# Altium footprint library TitansLib.PcbLib: 333 footprints (part 19 of 21)
Each footprint in its own frame and in the unit in brackets; x right, y up, seen from the top. Pads: shape width x height; smd on the part's side, far side on the other; paste and mask are expansions set on the pad; w line width, h text height; cw(c..) or ccw(c..) is an arc to the next point about the centre after c.
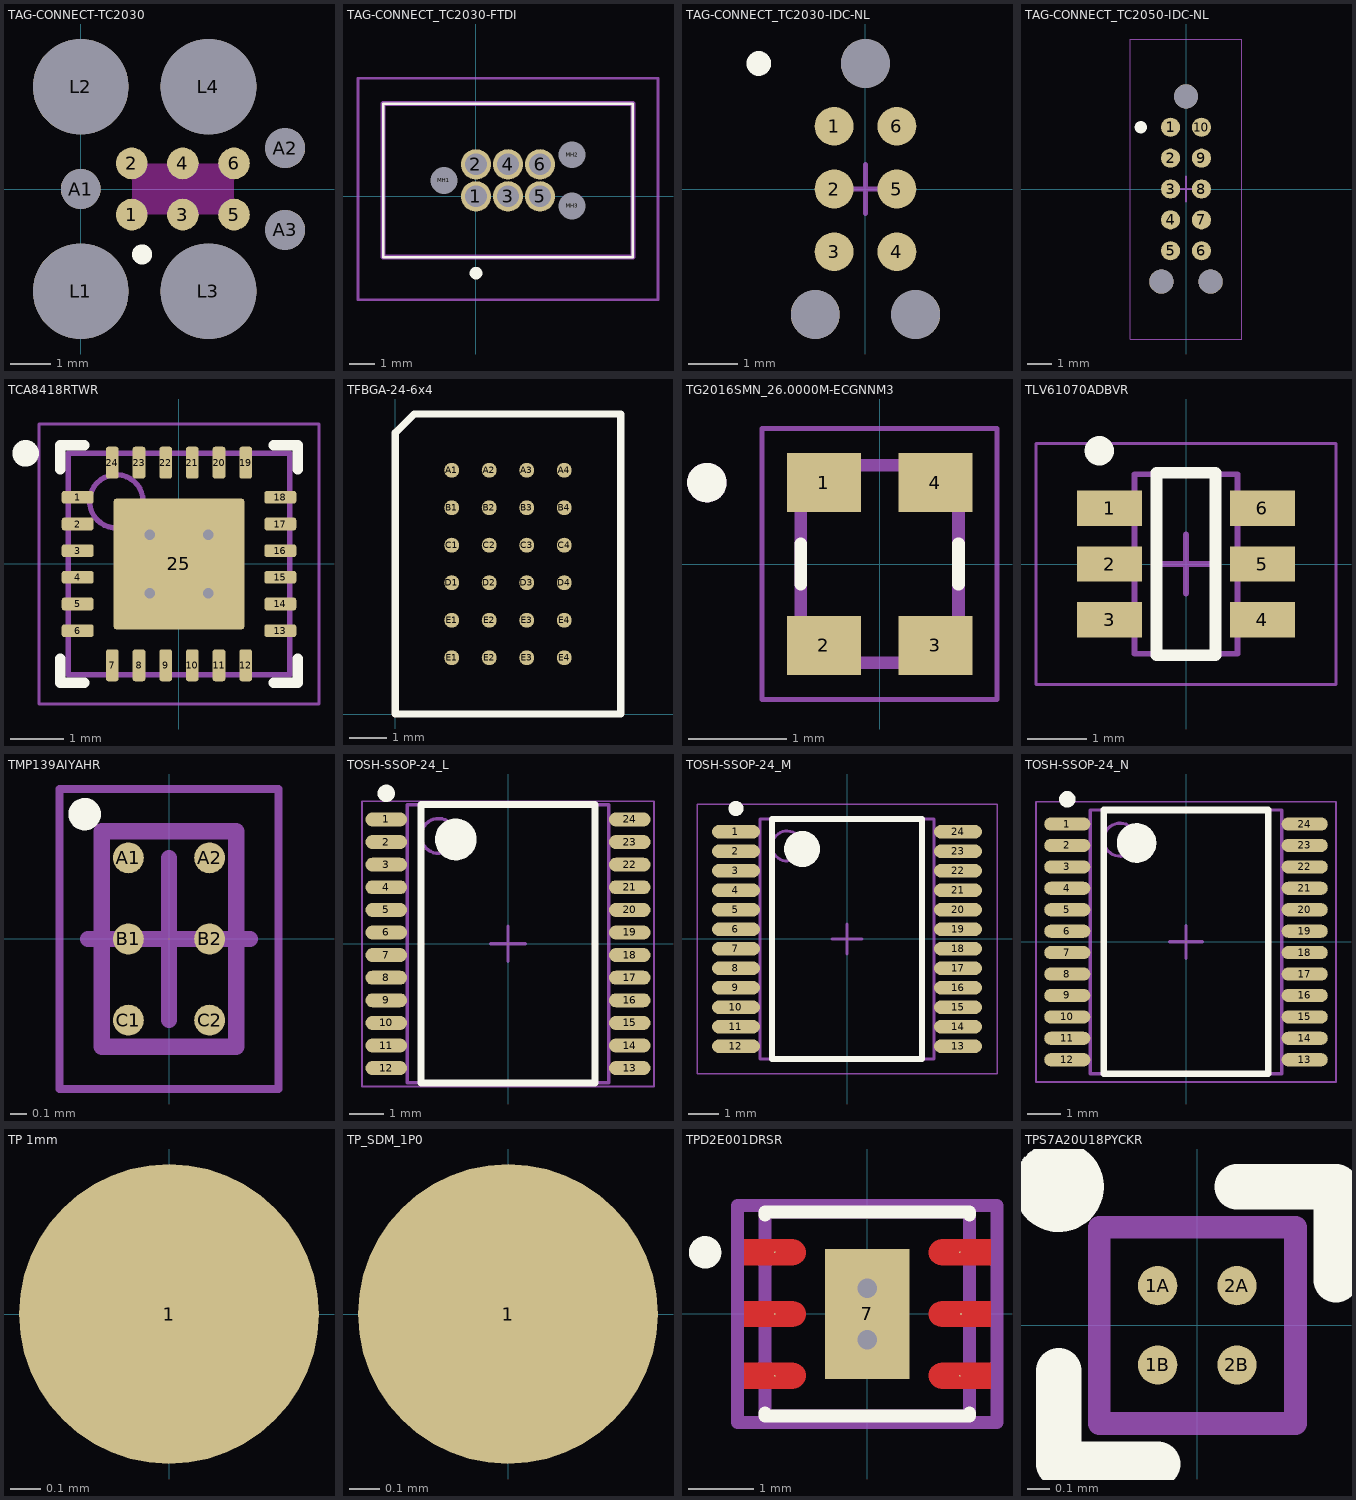
[diagram p18: the footprints below, top view; thin cyan lines are the x and y axes]

## TAG-CONNECT-TC2030 [mm]
pads (13):
  round 0.787 smd: 1(1.27,-0.635) 2(1.27,0.635) 3(2.54,-0.635) 4(2.54,0.635) 5(3.81,-0.635) 6(3.81,0.635)
  round 0.991 hole 0.991 unplated: A1(0,0) A2(5.08,1.016) A3(5.08,-1.016)
  round 2.375 hole 2.375 unplated: L1(0,-2.54) L2(0,2.54) L3(3.175,-2.54) L4(3.175,2.54)
Top Overlay:
  circle w0.3: c1.525,-1.625 r0.1
Keep-Out Layer:
  rectangle: 1.27,-0.635 3.81,0.635

## TAG-CONNECT_TC2030-FTDI [mm]
pads (9):
  round 1.2 hole 0.863: 1(0,0) 2(0,1.27) 3(1.27,0) 4(1.27,1.27) 5(2.54,0) 6(2.54,1.27)
  round 0.533 hole 1.067 unplated: MH1(-1.27,0.635) MH2(3.81,1.651) MH3(3.81,-0.381)
Top Overlay:
  lines w0.1: -3.683,-2.413 -3.683,3.683 6.223,3.683 6.223,-2.413 -3.683,-2.413
  lines w0.4: 0,-3.1 cw(c0,-3.05) 0,-3 ; 0,-3.1 ccw(c0,-3.05) 0,-3 ; 0,-3.1 cw(c0,-3.05) 0,-3
Mechanical 13:
  lines w0.2: -3.683,-2.413 -3.683,3.683 6.223,3.683 6.223,-2.413 -3.683,-2.413
Mechanical 15:
  lines w0.1: -4.683,-4.1 -4.683,4.683 7.223,4.683 7.223,-4.1 -4.683,-4.1

## TAG-CONNECT_TC2030-IDC-NL [mil] "2x3 tag connect"
pads (9):
  round 30.98 smd paste-39.37: 1(-25,50) 2(-25,0) 3(-25,-50) 4(25,-50) 5(25,0) 6(25,50)
  round 39.02 hole 39.02 unplated: ""(-40,-100) ""(0,100) ""(40,-100)
Top Overlay:
  circle w11.81: c-85,100 r3.94
Top Component Center:
  lines w3.94: -19.68,0 19.69,0 ; 0,-19.68 0,19.69

## TAG-CONNECT_TC2050-IDC-NL [mm]
pads (13):
  round 0.787 smd paste-1 mask+0.102: 1(-0.635,2.54) 2(-0.635,1.27) 3(-0.635,0) 4(-0.635,-1.27) 5(-0.635,-2.54) 6(0.635,-2.54) 7(0.635,-1.27) 8(0.635,0) 9(0.635,1.27) 10(0.635,2.54)
  round 0.991 hole 0.991 unplated: ""(-1.015,-3.81) ""(0,3.81) ""(1.015,-3.81)
Top Overlay:
  circle w0.3: c-1.859,2.54 r0.1
Top Courtyard:
  lines w0.05: -2.295,-6.17 2.295,-6.17 2.295,6.17 -2.295,6.17 -2.295,-6.17
Top Component Center:
  lines w0.1: -0.5,0 0.5,0 ; 0,-0.5 0,0.5

## TCA8418RTWR [mm] "QFN, 24-Leads, Body 4.00x4.00mm, Pitch 0.50mm, Thermal Pad 2.50x2.50mm, IPC Medium Density"
height 0.8
pads (25):
  rrect41% 0.6x0.24 smd mask+0.05: 1(-1.9,1.25) 2(-1.9,0.75) 3(-1.9,0.25) 4(-1.9,-0.25) 5(-1.9,-0.75) 6(-1.9,-1.25) 13(1.9,-1.25) 14(1.9,-0.75) 15(1.9,-0.25) 16(1.9,0.25) 17(1.9,0.75) 18(1.9,1.25)
  rrect41% 0.24x0.6 smd mask+0.05: 7(-1.25,-1.9) 8(-0.75,-1.9) 9(-0.25,-1.9) 10(0.25,-1.9) 11(0.75,-1.9) 12(1.25,-1.9) 19(1.25,1.9) 20(0.75,1.9) 21(0.25,1.9) 22(-0.25,1.9) 23(-0.75,1.9) 24(-1.25,1.9)
  rrect4% 2.45x2.45 smd mask+0.05: 25(0,0)
via -0.55,0.55 diameter 0.5 hole 0.2
via 0.55,0.55 diameter 0.5 hole 0.2
via -0.55,-0.55 diameter 0.5 hole 0.2
via 0.55,-0.55 diameter 0.5 hole 0.2
Top Overlay:
  circle w0.25: c-2.875,2.075 r0.125
  lines w0.2: -2.225,-1.775 -2.225,-2.225 -1.775,-2.225 ; -2.225,1.775 -2.225,2.225 -1.775,2.225 ; 1.775,-2.225 2.225,-2.225 2.225,-1.775 ; 1.775,2.225 2.225,2.225 2.225,1.775
Top Courtyard:
  lines w0.05: -2.625,-2.625 -2.625,2.625 2.625,2.625 2.625,-2.625 -2.625,-2.625
  lines w0.1: -0.5,0 0.5,0 ; 0,-0.5 0,0.5
Top Assembly:
  circle w0.1: c-1.175,1.175 r0.5
  lines w0.1: -2.075,-2.075 -2.075,2.075 2.075,2.075 2.075,-2.075 -2.075,-2.075
3D body "QFN50P400X400X80_HS-25N.step": height 0.8, standoff 0, extent -2.125,-2.125 2.125,2.125

## TFBGA-24-6x4 [mm]
pads (24):
  round 0.4 smd: A1(1.5,6.5) A2(2.5,6.5) A3(3.5,6.5) A4(4.5,6.5) B1(1.5,5.5) B2(2.5,5.5) B3(3.5,5.5) B4(4.5,5.5) C1(1.5,4.5) C2(2.5,4.5) C3(3.5,4.5) C4(4.5,4.5) D1(1.5,3.5) D2(2.5,3.5) D3(3.5,3.5) D4(4.5,3.5) E1(1.5,1.5) E1(1.5,2.5) E2(2.5,1.5) E2(2.5,2.5) E3(3.5,1.5) E3(3.5,2.5) E4(4.5,1.5) E4(4.5,2.5)
Top Overlay:
  lines w0.2: 0,0 0,7.5 0.5,8 6,8 6,0 0,0

## TG2016SMN_26.0000M-ECGNNM3 [mm]
height 0.8
pads (4):
  rect 0.75x0.6 smd mask+0.05: 1(-0.565,0.825) 2(-0.565,-0.825) 3(0.565,-0.825) 4(0.565,0.825)
Top Overlay:
  circle w0.2: c-1.75,0.825 r0.1
  lines w0.127: -0.8,-0.205 -0.8,0.205 ; 0.8,-0.205 0.8,0.205
Mechanical 13:
  circle w0.2: c-1.75,0.825 r0.1
  lines w0.127: -0.8,-1 -0.8,1 0.8,1 0.8,-1 -0.8,-1
Mechanical 15:
  lines w0.05: -1.19,-1.375 1.19,-1.375 1.19,1.375 -1.19,1.375 -1.19,-1.375

## TLV61070ADBVR [mm] "SOT23, 6-Leads, Body 2,90x2,80mm, Pitch 0,95mm, IPC Low Density"
height 1.45
pads (6):
  rect 1.1x0.6 smd: 1(-1.3,0.95) 2(-1.3,0) 3(-1.3,-0.95) 4(1.3,-0.95) 5(1.3,0) 6(1.3,0.95)
Top Overlay:
  circle w0.25: c-1.475,1.925 r0.125
  lines w0.2: -0.5,-1.55 0.5,-1.55 0.5,1.55 -0.5,1.55 -0.5,-1.55
Top Courtyard:
  lines w0.05: -2.55,-2.05 -2.55,2.05 2.55,2.05 2.55,-2.05 -2.55,-2.05
  lines w0.1: -0.5,0 0.5,0 ; 0,-0.5 0,0.5
Top Assembly:
  lines w0.1: -0.875,-1.525 -0.875,1.525 0.875,1.525 0.875,-1.525 -0.875,-1.525
3D body "TLV61070ADBVR.step": height 1.45, standoff 0, extent -1.5,-1.525 1.5,1.525

## TMP139AIYAHR [mm] "BGA, 6-Leads, Body 0,83x1,33mmx0,40mm, Pitch 0,50mm"
height 0.4
pads (6):
  round 0.19 smd: A1(-0.25,0.5) A2(0.25,0.5) B1(-0.25,0) B2(0.25,0) C1(-0.25,-0.5) C2(0.25,-0.5)
Top Overlay:
  circle w0.1: c-0.52,0.77 r0.05
Top Courtyard:
  lines w0.05: -0.675,-0.925 0.675,-0.925 0.675,0.925 -0.675,0.925 -0.675,-0.925
  lines w0.1: -0.5,0 0.5,0 ; 0,-0.5 0,0.5
Top Assembly:
  lines w0.1: -0.415,-0.665 0.415,-0.665 0.415,0.665 -0.415,0.665 -0.415,-0.665
3D body "TMP139AIYAHR.step": height 0.4, standoff 0, extent -0.415,-0.665 0.415,0.665

## TOSH-SSOP-24_L [mm] "SOP, 24-Leads, Body 8x5.8mm, Pitch 0.65mm, IPC High Density"
height 1.6
pads (24):
  oval 1.2x0.4 smd: 1(-3.5,3.575) 2(-3.5,2.925) 3(-3.5,2.275) 4(-3.5,1.625) 5(-3.5,0.975) 6(-3.5,0.325) 7(-3.5,-0.325) 8(-3.5,-0.975) 9(-3.5,-1.625) 10(-3.5,-2.275) 11(-3.5,-2.925) 12(-3.5,-3.575) 13(3.5,-3.575) 14(3.5,-2.925) 15(3.5,-2.275) 16(3.5,-1.625) 17(3.5,-0.975) 18(3.5,-0.325) 19(3.5,0.325) 20(3.5,0.975) 21(3.5,1.625) 22(3.5,2.275) 23(3.5,2.925) 24(3.5,3.575)
Top Overlay:
  circle w0.6: c-1.5,3 r0.3
  circle w0.25: c-3.5,4.325 r0.125
  lines w0.2: -2.5,-4 2.5,-4 2.5,4 -2.5,4 -2.5,-4
Mechanical 13:
  circle w0.1: c-2,3.1 r0.5
  lines w0.1: -2.9,-4 2.9,-4 2.9,4 -2.9,4 -2.9,-4
Mechanical 15:
  lines w0.05: -4.2,-4.1 4.2,-4.1 4.2,4.1 -4.2,4.1 -4.2,-4.1
  lines w0.1: -0.5,0 0.5,0 ; 0,-0.5 0,0.5
3D body "TSOP65P760X160-24L.step": height 1.6, standoff 0, extent -3.8,-4 3.8,4

## TOSH-SSOP-24_M [mm] "SOP, 24-Leads, Body 8x5.8mm, Pitch 0.65mm, IPC Low Density"
height 1.6
pads (24):
  oval 1.6x0.45 smd: 1(-3.7,3.575) 2(-3.7,2.925) 3(-3.7,2.275) 4(-3.7,1.625) 5(-3.7,0.975) 6(-3.7,0.325) 7(-3.7,-0.325) 8(-3.7,-0.975) 9(-3.7,-1.625) 10(-3.7,-2.275) 11(-3.7,-2.925) 12(-3.7,-3.575) 13(3.7,-3.575) 14(3.7,-2.925) 15(3.7,-2.275) 16(3.7,-1.625) 17(3.7,-0.975) 18(3.7,-0.325) 19(3.7,0.325) 20(3.7,0.975) 21(3.7,1.625) 22(3.7,2.275) 23(3.7,2.925) 24(3.7,3.575)
Top Overlay:
  circle w0.25: c-3.7,4.35 r0.125
  circle w0.6: c-1.5,3 r0.3
  lines w0.2: -2.5,-4 -2.5,4 2.5,4 2.5,-4 -2.5,-4
Mechanical 13:
  circle w0.1: c-2,3.1 r0.5
  lines w0.1: -2.9,-4 -2.9,4 2.9,4 2.9,-4 -2.9,-4
Mechanical 15:
  lines w0.05: -5,-4.5 -5,4.5 5,4.5 5,-4.5 -5,-4.5
  lines w0.1: -0.5,0 0.5,0 ; 0,-0.5 0,0.5
3D body "TSOP65P760X160-24M.step": height 1.6, standoff 0, extent -3.8,-4 3.8,4

## TOSH-SSOP-24_N [mm] "SOP, 24-Leads, Body 8x5.8mm, Pitch 0.65mm, IPC Medium Density"
height 1.6
pads (24):
  oval 1.4x0.4 smd: 1(-3.6,3.575) 2(-3.6,2.925) 3(-3.6,2.275) 4(-3.6,1.625) 5(-3.6,0.975) 6(-3.6,0.325) 7(-3.6,-0.325) 8(-3.6,-0.975) 9(-3.6,-1.625) 10(-3.6,-2.275) 11(-3.6,-2.925) 12(-3.6,-3.575) 13(3.6,-3.575) 14(3.6,-2.925) 15(3.6,-2.275) 16(3.6,-1.625) 17(3.6,-0.975) 18(3.6,-0.325) 19(3.6,0.325) 20(3.6,0.975) 21(3.6,1.625) 22(3.6,2.275) 23(3.6,2.925) 24(3.6,3.575)
Top Overlay:
  circle w0.25: c-3.6,4.325 r0.125
  circle w0.6: c-1.5,3 r0.3
  lines w0.2: -2.5,-4 -2.5,4 2.5,4 2.5,-4 -2.5,-4
Mechanical 13:
  circle w0.1: c-2,3.1 r0.5
  lines w0.1: -2.9,-4 -2.9,4 2.9,4 2.9,-4 -2.9,-4
Mechanical 15:
  lines w0.05: -4.55,-4.25 -4.55,4.25 4.55,4.25 4.55,-4.25 -4.55,-4.25
  lines w0.1: -0.5,0 0.5,0 ; 0,-0.5 0,0.5
3D body "TSOP65P760X160-24N.step": height 1.6, standoff 0, extent -3.8,-4 3.8,4

## TP 1mm [mm]
pads (1):
  round 1 smd paste-2539.97 mask+0.051: 1(0,0)

## TP_SDM_1P0 [mm]
pads (1):
  round 1 smd: 1(0,0)

## TPD2E001DRSR [mil]
pads (7):
  round 1 smd paste+0 mask+1.97: 1(-56.1,37.4) 2(-56.1,0) 3(-56.1,-37.4) 4(56.1,-37.4) 5(56.91,0) 6(56.1,37.4)
  rect 51.18x78.74 smd paste+0 mask+1.97: 7(0,0)
via 0,15.75 diameter 23.62 hole 11.81
via 0,-15.75 diameter 23.62 hole 11.81
Top Layer:
  region: 74.8,-45.28 45.28,-45.28 44.5,-45.28 42.98,-44.97 41.55,-44.38 40.26,-43.52 39.16,-42.42 38.3,-41.13 37.7,-39.7 37.4,-38.18 37.4,-37.4 37.4,-36.63 37.7,-35.1 38.3,-33.67 39.16,-32.38 40.26,-31.29 41.55,-30.42 42.98,-29.83 44.5,-29.53 45.28,-29.53 74.8,-29.53
  region: 74.8,-7.87 45.28,-7.87 44.5,-7.87 42.98,-7.57 41.55,-6.98 40.26,-6.12 39.16,-5.02 38.3,-3.73 37.7,-2.3 37.4,-0.78 37.4,0 37.4,0.78 37.7,2.3 38.3,3.73 39.16,5.02 40.26,6.12 41.55,6.98 42.98,7.57 44.5,7.87 45.28,7.87 74.8,7.87
  region: 74.8,29.53 45.28,29.53 44.5,29.53 42.98,29.83 41.55,30.42 40.26,31.29 39.16,32.38 38.3,33.67 37.7,35.1 37.4,36.63 37.4,37.4 37.4,38.18 37.7,39.7 38.3,41.13 39.16,42.42 40.26,43.52 41.55,44.38 42.98,44.97 44.5,45.28 45.28,45.28 74.8,45.28
  region: -74.8,45.28 -45.28,45.28 -44.5,45.28 -42.98,44.97 -41.55,44.38 -40.26,43.52 -39.16,42.42 -38.3,41.13 -37.7,39.7 -37.4,38.18 -37.4,37.4 -37.4,36.63 -37.7,35.1 -38.3,33.67 -39.16,32.38 -40.26,31.29 -41.55,30.42 -42.98,29.83 -44.5,29.53 -45.28,29.53 -74.8,29.53
  region: -74.8,7.87 -45.28,7.87 -44.5,7.87 -42.98,7.57 -41.55,6.98 -40.26,6.12 -39.16,5.02 -38.3,3.73 -37.7,2.3 -37.4,0.78 -37.4,0 -37.4,-0.78 -37.7,-2.3 -38.3,-3.73 -39.16,-5.02 -40.26,-6.12 -41.55,-6.98 -42.98,-7.57 -44.5,-7.87 -45.28,-7.87 -74.8,-7.87
  region: -74.8,-29.53 -45.28,-29.53 -44.5,-29.53 -42.98,-29.83 -41.55,-30.42 -40.26,-31.29 -39.16,-32.38 -38.3,-33.67 -37.7,-35.1 -37.4,-36.63 -37.4,-37.4 -37.4,-38.18 -37.7,-39.7 -38.3,-41.13 -39.16,-42.42 -40.26,-43.52 -41.55,-44.38 -42.98,-44.97 -44.5,-45.28 -45.28,-45.28 -74.8,-45.28
Top Overlay:
  circle w9.84: c-98.43,37.4 r4.92
  lines w7.87: -62.01,-60.04 -62.01,-62.01 62.01,-62.01 62.01,-60.04 ; -62.01,60.04 -62.01,62.01 62.01,62.01 62.01,60.04
Top 3D Body:
  lines w7.87: -62.01,-62.01 62.01,-62.01 62.01,62.01 -62.01,62.01 -62.01,-62.01
Top Courtyard:
  lines w7.87: -78.74,-65.94 78.74,-65.94 78.74,65.94 -78.74,65.94 -78.74,-65.94
Top Component Center:
  lines w3.94: -19.68,0 19.68,0 ; 0,-19.68 0,19.68
Top Assembly:
  lines w7.87: -78.74,-65.94 78.74,-65.94 78.74,65.94 -78.74,65.94 -78.74,-65.94
  text ".Designator" at 0,-0.02 h39.37
3D body "TPD2E001DRSR.step": height 32, standoff 0.5, extent -59.06,-59.06 59.06,59.06

## TPS7A20U18PYCKR [mm]
pads (4):
  round 0.173 smd: 1A(-0.175,0.175) 1B(-0.175,-0.175) 2A(0.175,0.175) 2B(0.175,-0.175)
Top Overlay:
  circle w0.2: c-0.612,0.612 r0.1
  lines w0.2: -0.612,-0.611 -0.612,-0.2 ; -0.611,-0.612 -0.175,-0.612 ; 0.175,0.612 0.611,0.612 ; 0.612,0.2 0.612,0.611
Mechanical 15:
  lines w0.1: -0.433,-0.433 -0.433,0.433 0.433,0.433 0.433,-0.433 -0.433,-0.433